# Altium footprint library SAM-M10Q-00B.PcbLib: 1 footprints
Each footprint in its own frame and in the unit in brackets; x right, y up, seen from the top. Pads: shape width x height; smd on the part's side, far side on the other; paste and mask are expansions set on the pad; w line width, h text height; cw(c..) or ccw(c..) is an arc to the next point about the centre after c.
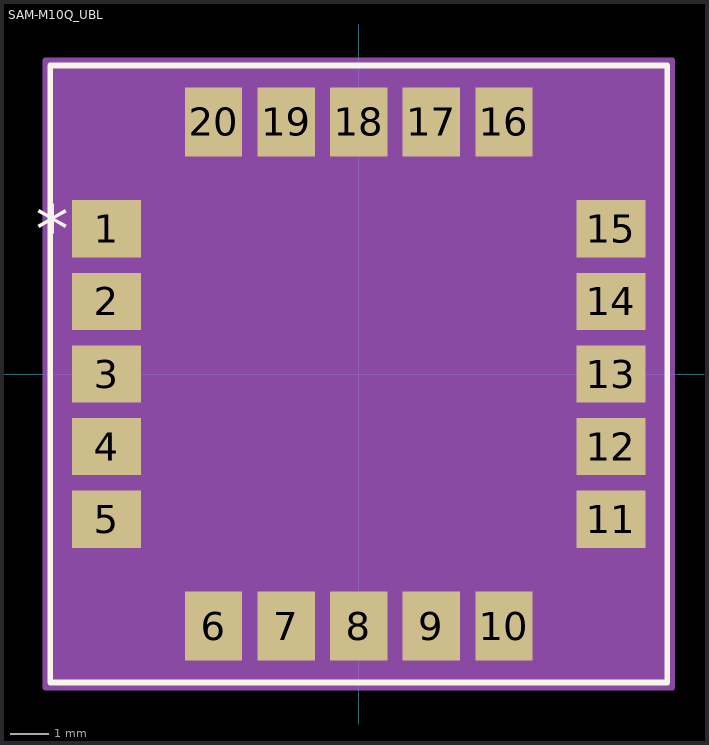
[diagram p0: the footprint, top view; thin cyan lines are the x and y axes]

## SAM-M10Q_UBL [mil]
pads (20):
  rect 71x59 smd paste+0 mask+0: 1(-259.84,149.61) 2(-259.84,74.8) 3(-259.84,0) 4(-259.84,-74.8) 5(-259.84,-149.61) 11(259.84,-149.61) 12(259.84,-74.8) 13(259.84,0) 14(259.84,74.8) 15(259.84,149.61)
  rect 59x71 smd paste+0 mask+0: 6(-149.61,-259.84) 7(-74.8,-259.84) 8(0,-259.84) 9(74.8,-259.84) 10(149.61,-259.84) 16(149.61,259.84) 17(74.8,259.84) 18(0,259.84) 19(-74.8,259.84) 20(-149.61,259.84)
Top Overlay:
  lines w6: -318,-318 318,-318 318,318 -318,318 -318,-318
  text "*" at -332.84,124.61 h50
  text ".Designator" at -137.5,-25 h50
Mechanical 13:
  lines w1: -313,263 -263,313 ; -313,-313 313,-313 313,313 -313,313 -313,-313
  text ".Designator" at -137.5,-25 h50
  text "*" at -211.84,124.61 h50
Mechanical 15:
  region: -189.11,-323 -323,-323 -323,-189.11 -323,189.11 -323,323 -189.11,323 189.11,323 323,323 323,189.11 323,-189.11 323,-323 189.11,-323
  lines w6: -323,-189.11 -323,-323 -189.11,-323 ; -323,-189.11 -323,-189.11 ; -323,-189.11 -323,189.11 ; -323,189.11 -323,189.11 ; -323,189.11 -323,323 -189.11,323 ; -189.11,-323 189.11,-323 ; -189.11,-323 -189.11,-323 ; -189.11,323 -189.11,323 ; -189.11,323 189.11,323 ; 189.11,-323 323,-323 323,-189.11 ; 189.11,-323 189.11,-323 ; 189.11,323 189.11,323 ; 189.11,323 323,323 323,189.11 ; 323,-189.11 323,189.11 ; 323,-189.11 323,-189.11 ; 323,189.11 323,189.11
3D body "SAM-M10Q_UBL.step": height 268.11, standoff 0, extent -312.99,-312.99 312.99,312.99